# Altium footprint library SamacSys.PcbLib: 1008 footprints (part 46 of 63)
Each footprint in its own frame and in the unit in brackets; x right, y up, seen from the top. Pads: shape width x height; smd on the part's side, far side on the other; paste and mask are expansions set on the pad; w line width, h text height; cw(c..) or ccw(c..) is an arc to the next point about the centre after c.
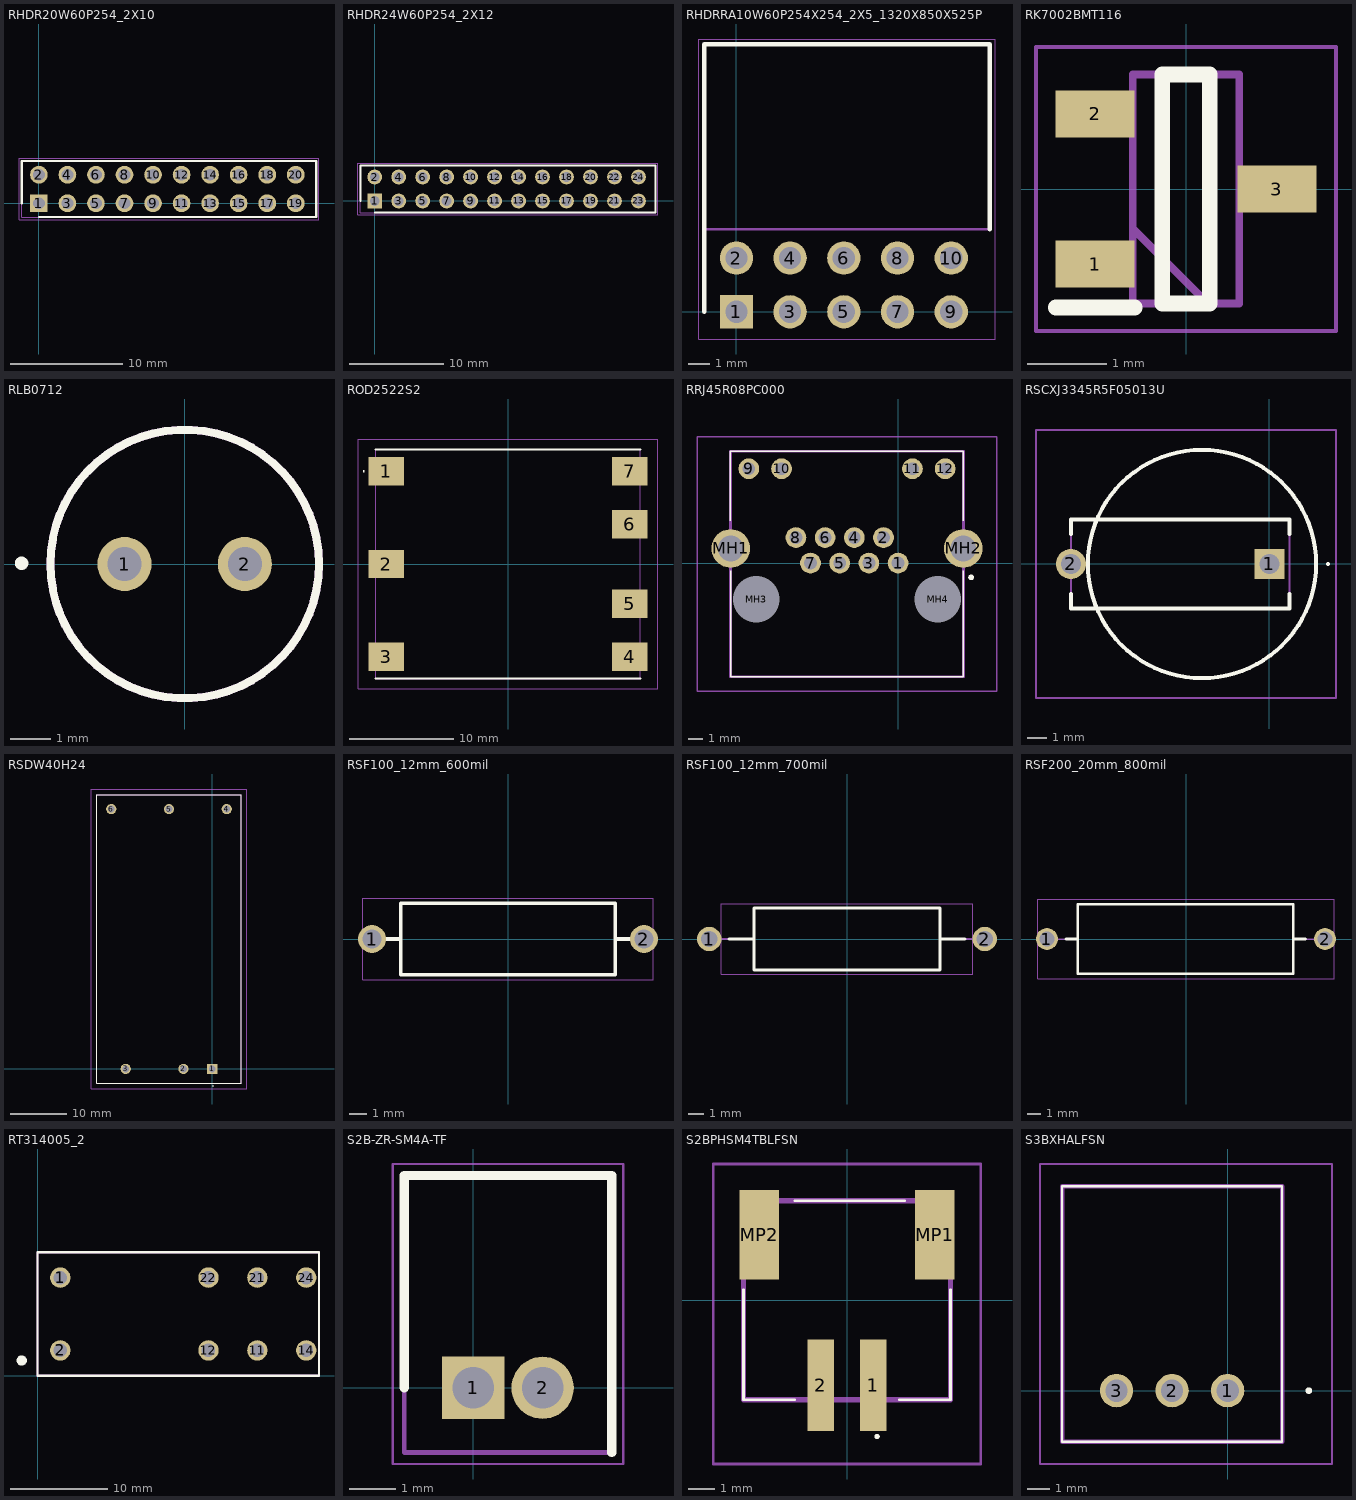
[diagram p45: the footprints below, top view; thin cyan lines are the x and y axes]

## RHDR20W60P254_2X10 [mm]
pads (20):
  rect 1.575x1.575 hole 1.05: 1(0,0)
  round 1.575 hole 1.05: 2(0,2.54) 3(2.54,0) 4(2.54,2.54) 5(5.08,0) 6(5.08,2.54) 7(7.62,0) 8(7.62,2.54) 9(10.16,0) 10(10.16,2.54) 11(12.7,0) 12(12.7,2.54) 13(15.24,0) 14(15.24,2.54) 15(17.78,0) 16(17.78,2.54)
  round 1.575 hole 1.05 unplated: 17(20.32,0) 18(20.32,2.54) 19(22.86,0) 20(22.86,2.54)
Top Overlay:
  lines w0.2: -1.52,0 -1.52,3.77 24.68,3.77 24.68,-1.23 0,-1.23
Assembly:
  lines w0.1: -1.52,-1.23 24.68,-1.23 24.68,3.77 -1.52,3.77 -1.52,-1.23
Countryard:
  lines w0.05: -1.77,-1.48 24.93,-1.48 24.93,4.02 -1.77,4.02 -1.77,-1.48
3D body "User Library-PBD_(DS1023-2)_2line_connectors_h=5_0_8_5mm_step_2_54mm_fixed (1).step": height 5, standoff -3.3, extent -1.52,-1.21 24.38,3.79

## RHDR24W60P254_2X12 [mm]
pads (24):
  rect 1.575x1.575 hole 1.05: 1(0,0)
  round 1.575 hole 1.05: 2(0,2.54) 3(2.54,0) 4(2.54,2.54) 5(5.08,0) 6(5.08,2.54) 7(7.62,0) 8(7.62,2.54) 9(10.16,0) 10(10.16,2.54) 11(12.7,0) 12(12.7,2.54) 13(15.24,0) 14(15.24,2.54) 15(17.78,0) 16(17.78,2.54)
  round 1.575 hole 1.05 unplated: 17(20.32,0) 18(20.32,2.54) 19(22.86,0) 20(22.86,2.54) 21(25.4,0) 22(25.4,2.54) 23(27.94,0) 24(27.94,2.54)
Top Overlay:
  lines w0.2: -1.52,0 -1.52,3.77 29.76,3.77 29.76,-1.23 0,-1.23
Assembly:
  lines w0.1: -1.52,-1.23 -1.52,3.77 29.76,3.77 29.76,-1.23 -1.52,-1.23
Countryard:
  lines w0.05: -1.77,-1.48 -1.77,4.02 30.01,4.02 30.01,-1.48 -1.77,-1.48
3D body "User Library-PBD_(DS1023-2)_2line_connectors_h=5_0_8_5mm_step_2_54mm.step": height 5, standoff -3.3, extent -1.52,-1.21 29.46,3.79

## RHDRRA10W60P254X254_2X5_1320X850X525P [mm]
pads (10):
  rect 1.575x1.575 hole 1.05: 1(0,0)
  round 1.575 hole 1.05: 2(0,2.54) 3(2.54,0) 4(2.54,2.54) 5(5.08,0) 6(5.08,2.54) 7(7.62,0) 8(7.62,2.54) 9(10.16,0) 10(10.16,2.54)
Top Overlay:
  lines w0.2: -1.52,0 -1.52,12.65 11.98,12.65 11.98,3.9
Assembly:
  lines w0.1: -1.52,3.9 -1.52,12.65 11.98,12.65 11.98,3.9 -1.52,3.9
Countryard:
  lines w0.05: -1.77,-1.288 12.23,-1.288 12.23,12.9 -1.77,12.9 -1.77,-1.288
3D body "DS1024-2X5R0.stp": height 5.25, standoff -3.88, extent -1.52,-0.3 11.68,12.4

## RK7002BMT116 [mm]
pads (3):
  rect 1x0.6 smd: 1(-1.15,-0.95) 2(-1.15,0.95) 3(1.15,0)
Top Overlay:
  lines w0.2: -1.65,-1.5 -0.65,-1.5 ; -0.3,-1.45 -0.3,1.45 0.3,1.45 0.3,-1.45 -0.3,-1.45
Assembly:
  lines w0.1: -0.675,-0.5 0.275,-1.45 ; -0.675,-1.45 -0.675,1.45 0.675,1.45 0.675,-1.45 -0.675,-1.45
Countryard:
  lines w0.05: -1.9,-1.8 -1.9,1.8 1.9,1.8 1.9,-1.8 -1.9,-1.8
3D body "DTC114ECAHZGT116.stp": height 1.05, standoff 0, extent -1.2,-1.45 1.2,1.45

## RLB0712 [mm]
pads (2):
  round 1.35 hole 0.85: 1(-1.5,0) 2(1.5,0)
Top Overlay:
  circle w0.2: c0,0 r3.35
  circle w0.2: c-4.066,0.018 r0.066
Assembly:
  circle w0.2: c0,0 r3.35
3D body "RLB0712-100KL.stp": height 10.06, standoff -24.94, extent -3.35,-3.35 3.35,3.35

## ROD2522S2 [mm]
pads (7):
  rect 3.4x2.7 smd: 1(-11.7,8.9) 2(-11.7,0) 3(-11.7,-8.9) 4(11.7,-8.9) 5(11.7,-3.81) 6(11.7,3.81) 7(11.7,8.9)
Top Overlay:
  lines w0.1: -13.9,8.9 ccw(c-13.85,8.9) -13.8,8.9 ccw(c-13.85,8.9) -13.9,8.9
  lines w0.2: -12.7,-11 12.7,-11 ; -12.7,11 12.7,11
Assembly:
  lines w0.1: -12.7,-11 12.7,-11 12.7,11 -12.7,11 -12.7,-11
Countryard:
  lines w0.1: -14.4,-12 14.4,-12 14.4,12 -14.4,12 -14.4,-12
3D body "ROD2522S2.stp": height 12.5, standoff 0, extent -13.13,-11 13.13,11

## RRJ45R08PC000 [mm]
pads (16):
  round 1.446 hole 0.89: 1(0,0) 2(-1.02,1.78) 3(-2.04,0) 4(-3.06,1.78) 5(-4.08,0) 6(-5.1,1.78) 7(-6.12,0) 8(-7.14,1.78) 9(-10.43,6.59) 10(-8.14,6.59) 11(1,6.59) 12(3.29,6.59)
  round 2.7 hole 1.8: MH1(-11.7,1.02) MH2(4.56,1.02)
  round 1.625 hole 3.25 unplated: MH3(-9.92,-2.54) MH4(2.78,-2.54)
Top Overlay:
  lines w0.1: -11.72,2.96 -11.72,7.81 4.56,7.81 4.56,2.96 ; -11.7,-0.54 -11.7,-7.94 4.56,-7.94 4.56,-0.54
  lines w0.2: 5,-1 cw(c5.1,-1) 5.2,-1 cw(c5.1,-1) 5,-1
Assembly:
  lines w0.2: -11.7,-7.94 -11.7,7.81 4.56,7.81 4.56,-7.94 -11.7,-7.94
Countryard:
  lines w0.1: -14.05,-8.94 -14.05,8.81 6.91,8.81 6.91,-8.94 -14.05,-8.94
3D body "R-RJ45R08P-C000.stp": height 13.5, standoff -5, extent -12.5,-7.94 5.36,7.81

## RSCXJ3345R5F05013U [mm]
pads (2):
  rect 1.515x1.515 hole 1.01: 1(0,0)
  round 1.515 hole 1.01: 2(-10,0)
Top Overlay:
  lines w0.1: 2.9,0 ccw(c2.95,0) 3,0 ccw(c2.95,0) 2.9,0
  lines w0.2: -10,-1.5 -10,-2.25 1,-2.25 1,-1.5 ; -10,1.5 -10,2.25 1,2.25 1,1.5 ; -3.4,-5.75 ccw(c-3.4,0) -3.4,5.75 ccw(c-3.4,0) -3.4,-5.75
Assembly:
  lines w0.1: -10,-2.25 1,-2.25 1,2.25 -10,2.25 -10,-2.25 ; -3.4,-5.75 ccw(c-3.4,0) -3.4,5.75 ccw(c-3.4,0) -3.4,-5.75
Countryard:
  lines w0.1: -11.758,-6.75 -11.758,6.75 3.35,6.75 3.35,-6.75 -11.758,-6.75
3D body "RSCXJ3345R5F05013U.stp": height 5.6, standoff -5, extent -10.405,-5.75 2.35,5.75

## RSDW40H24 [mm]
pads (6):
  rect 1.8x1.8 hole 1.2: 1(0,0)
  round 1.8 hole 1.2: 2(-5.08,0) 3(-15.24,0) 4(2.54,45.72) 5(-7.62,45.72) 6(-17.78,45.72)
Top Overlay:
  lines w0.1: 0.1,-3.1 cw(c0.1,-3.05) 0.1,-3 cw(c0.1,-3.05) 0.1,-3.1
  lines w0.2: -20.32,-2.54 5.08,-2.54 5.08,48.26 -20.32,48.26 -20.32,-2.54
Assembly:
  lines w0.1: -20.32,-2.54 5.08,-2.54 5.08,48.26 -20.32,48.26 -20.32,-2.54
Countryard:
  lines w0.1: -21.32,-3.54 -21.32,49.26 6.08,49.26 6.08,-3.54 -21.32,-3.54
3D body "RSDW40H-24.stp": height 10.95, standoff -5, extent -20.32,-2.54 5.08,48.26

## RSF100_12mm_600mil [mm]
pads (2):
  round 1.575 hole 1.05: 1(-7.62,0) 2(7.62,0)
Top Overlay:
  lines w0.2: -6.858,0 -6.002,0 ; 6.069,0 6.949,0 ; -6,-2 6,-2 6,2 -6,2 -6,-2
Assembly:
  lines w0.1: -7.62,0 -6.002,0 ; 6.069,0 7.62,0 ; -6,-2 6,-2 6,2 -6,2 -6,-2
Countryard:
  lines w0.05: -8.128,-2.286 8.128,-2.286 8.128,2.286 -8.128,2.286 -8.128,-2.286
3D body "User Library-Res60 1W SilCoat Master.step": height 4.52, standoff -2, extent -7.995,-2.238 7.995,2.238

## RSF100_12mm_700mil [mm]
pads (2):
  round 1.575 hole 1.05: 1(-8.89,0) 2(8.89,0)
Top Overlay:
  lines w0.2: -7.62,0 -6.002,0 ; 6.069,0 7.62,0 ; -6,-2 6,-2 6,2 -6,2 -6,-2
Assembly:
  lines w0.1: -8.89,0 -6.002,0 ; 6.069,0 8.89,0 ; -6,-2 6,-2 6,2 -6,2 -6,-2
Countryard:
  lines w0.05: -8.128,-2.286 8.128,-2.286 8.128,2.286 -8.128,2.286 -8.128,-2.286
3D body "User Library-Res70 1W SilCoat.step": height 4.52, standoff -2, extent -9.265,-2.242 9.265,2.242

## RSF200_20mm_800mil [mm]
pads (2):
  round 1.575 hole 1.05: 1(-10,0) 2(10,0)
Top Overlay:
  lines w0.2: -8.636,0 -7.78,0 ; 7.72,0 8.6,0 ; -7.78,-2.5 7.72,-2.5 7.72,2.5 -7.78,2.5 -7.78,-2.5
Assembly:
  lines w0.1: -10.16,0 -7.78,0 ; 7.72,0 10.16,0 ; -7.78,-2.5 7.72,-2.5 7.72,2.5 -7.78,2.5 -7.78,-2.5
Countryard:
  lines w0.05: -10.668,-2.85 10.668,-2.85 10.668,2.85 -10.668,2.85 -10.668,-2.85
3D body "User Library-Res80 2W SilCoat.step": height 5.27, standoff -2, extent -10.565,-2.738 10.565,2.738

## RT314005_2 [mm]
pads (8):
  round 2.1 hole 1.4: 1(2.35,10.1) 2(2.35,2.6) 11(22.65,2.6) 12(17.61,2.6) 14(27.69,2.6) 21(22.65,10.1) 22(17.61,10.1) 24(27.69,10.1)
Top Overlay:
  circle w0.5: c-1.628,1.559 r0.279
  lines w0.254: 0,0 29,0 29,12.7 0,12.7 0,0
Assembly:
  lines w0.254: 0,0 0,12.7 29,12.7 29,0 0,0
3D body "RT314005.stp": height 16.04, standoff -3.26, extent 0.14,0 29.14,12.7

## S2B-ZR-SM4A-TF [mm] "JST, ZH series, 1.5 pitch"
height 3.7
pads (2):
  rect 1.35x1.35 hole 0.9: 1(0,0)
  round 1.35 hole 0.9: 2(1.5,0)
Top Overlay:
  lines w0.2: -1.5,0 -1.5,4.6 3,4.6 3,-1.4
Assembly:
  lines w0.1: -1.5,-1.4 3,-1.4 3,4.6 -1.5,4.6 -1.5,-1.4
Countryard:
  lines w0.05: -1.75,-1.65 -1.75,4.85 3.25,4.85 3.25,-1.65 -1.75,-1.65

## S2BPHSM4TBLFSN [mm]
pads (4):
  rect 1x3.5 smd: 1(1,-3.25) 2(-1,-3.25)
  rect 1.5x3.4 smd: MP1(3.35,2.5) MP2(-3.35,2.5)
Top Overlay:
  lines w0.1: -3.95,0.4 -3.95,-3.8 -2,-3.8 ; -2,3.8 2.2,3.8 ; 2,-3.8 3.95,-3.8 3.95,0.4 ; 1.1,-5.2 ccw(c1.15,-5.2) 1.2,-5.2 ccw(c1.15,-5.2) 1.1,-5.2
Assembly:
  lines w0.2: -3.95,-3.8 -3.95,3.8 3.95,3.8 3.95,-3.8 -3.95,-3.8
Countryard:
  lines w0.1: -5.1,-6.25 -5.1,5.2 5.1,5.2 5.1,-6.25 -5.1,-6.25
3D body "S2B-PH-SM4-TB_LF__SN_.stp": height 5.6, standoff 0, extent -3.95,-4.83 3.95,3.77

## S3BXHALFSN [mm]
pads (3):
  round 1.5 hole 1: 1(0,0) 2(-2.5,0) 3(-5,0)
Top Overlay:
  lines w0.1: -7.45,-2.3 -7.45,9.2 2.45,9.2 2.45,-2.3 -7.45,-2.3
  lines w0.2: 3.6,0 ccw(c3.65,0) 3.7,0 ; 3.6,0 cw(c3.65,0) 3.7,0 ; 3.6,0 ccw(c3.65,0) 3.7,0
Assembly:
  lines w0.2: -7.45,-2.3 -7.45,9.2 2.45,9.2 2.45,-2.3 -7.45,-2.3
Countryard:
  lines w0.1: -8.45,-3.3 -8.45,10.2 4.7,10.2 4.7,-3.3 -8.45,-3.3
3D body "S3B-XH-A_LF__SN_.stp": height 6.9, standoff -3.5, extent -7.401,-3.301 2.499,2.449